# Altium schematic symbol library Relay.SchLib: 4 symbols
Pins are listed as number, name and electrical type; pins without a type are passive.

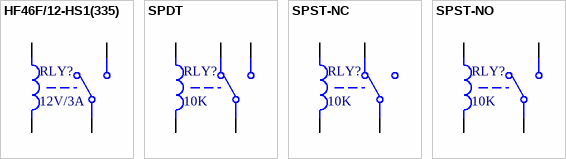
[diagram p0: symbols HF46F/12-HS1(335) to SPST-NO]

## HF46F/12-HS1(335)
designator RLY?, comment 12V/3A
SPST-NO; Manufacturer: HONGFA; Manufacturer Part Number: HF46F/12-HS1(335); Case/Package: 0201; Case Code (Imperial): 0201; Min Operating Temperature: -40C; Category: RELAY; Sub-Category: SPST-NO; Mount: THT; Local Supplier: GENERAL
footprint HF46F/12-HS1(335)
pins: +, -, COM, NO

## SPDT
designator RLY?, comment 10K
RELAY_SYMBOL; Case/Package: 0201; Case Code (Imperial): 0201; Category: RELAY; Local Supplier: GENERAL
pins: +, -, COM, NC, NO

## SPST-NC
designator RLY?, comment 10K
RELAY_SYMBOL; Case/Package: 0201; Case Code (Imperial): 0201; Category: RELAY; Local Supplier: GENERAL
pins: +, -, COM, NC

## SPST-NO
designator RLY?, comment 10K
RELAY_SYMBOL; Case/Package: 0201; Case Code (Imperial): 0201; Category: RELAY; Local Supplier: GENERAL
pins: +, -, COM, NO